# Altium integrated library Altium_Power_Supply_IC.IntLib: 96 symbols (part 1 of 2)
Pins are listed as number, name and electrical type; pins without a type are passive.

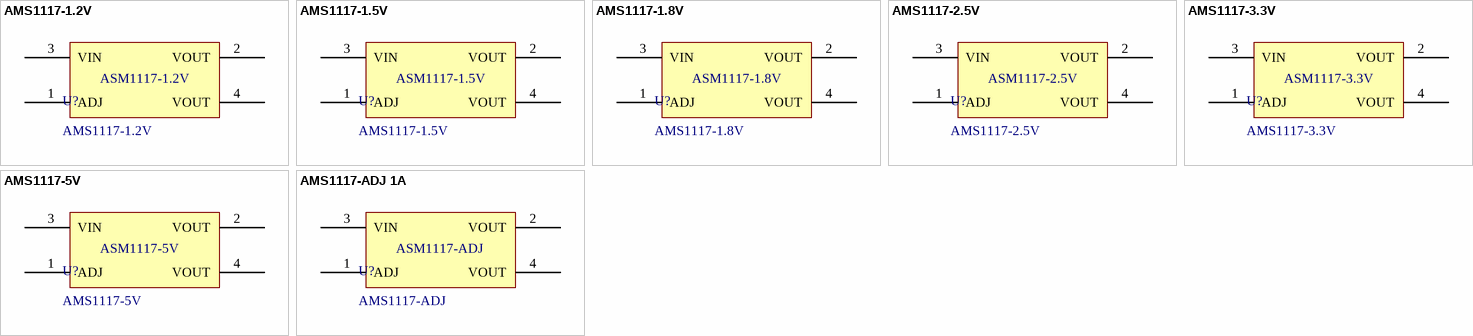
[diagram p0: symbols AMS1117-1.2V to AMS1117-ADJ 1A]

## AMS1117-1.2V
designator U?
AMS1117-1.2V, OUT 1.2V 1A.; Manufacturer: AMS; Pad Count: 4; Current Output Maximum: 1A; Voltage Input Maximum: 15V; Manufacturer Part Number: *; Part Number: *; Current Input Maximum: *; Supplier 1 Link: *; Supplier 1 Name: *; Supplier 2 Link: *; Supplier 2 Name: *; Supplier 2 Part Number: *; Supplier 3 Link: https://www.thegioiic.com/ams1117-1-2v-ic-on-ap-1-2v-1a-sot-223; Supplier 3 Name: ThegioiIC; Supplier 3 Part Number: *; Voltage Output: 1.2V; Mounting Technology: SMD; Supplier 1 Part Number: *; Datasheet: *
footprint AMS1117-1.2V SOT223 (SOT223, 4-Leads, Body 6.51x7.00mm, Pitch 2.29mm)
pins: 1 ADJ (power), 2 VOUT, 3 VIN, 4 VOUT (power)
text: ASM1117-1.2V

## AMS1117-1.5V
designator U?
AMS1117-1.5V, OUT 1.5V 1A.; Manufacturer: AMS; Pad Count: 4; Current Output Maximum: 1A; Voltage Input Maximum: 15V; Manufacturer Part Number: *; Part Number: *; Current Input Maximum: *; Supplier 1 Link: *; Supplier 1 Name: *; Supplier 2 Link: *; Supplier 2 Name: *; Supplier 2 Part Number: *; Supplier 3 Link: https://www.thegioiic.com/ams1117-1-5v-ic-on-ap-1-5v-1a-sot-223; Supplier 3 Name: ThegioiIC; Supplier 3 Part Number: *; Voltage Output: 1.5V; Mounting Technology: SMD; Supplier 1 Part Number: *; Datasheet: http://www.ams-semitech.com/attachments/File/AMS1117_20120314.pdf
footprint AMS1117-1.5V SOT223 (SOT223, 4-Leads, Body 6.51x7.00mm, Pitch 2.29mm)
pins: 1 ADJ (power), 2 VOUT, 3 VIN, 4 VOUT (power)
text: ASM1117-1.5V

## AMS1117-1.8V
designator U?
AMS1117-1.8V, OUT 1.8V 1A.; Manufacturer: AMS; Pad Count: 4; Current Output Maximum: 1A; Voltage Input Maximum: 15V; Manufacturer Part Number: *; Part Number: *; Current Input Maximum: *; Supplier 1 Link: *; Supplier 1 Name: *; Supplier 2 Link: *; Supplier 2 Name: *; Supplier 2 Part Number: *; Supplier 3 Link: https://www.thegioiic.com/ams1117-1-8v-ic-on-ap-1-8v-1a-sot-223; Supplier 3 Name: ThegioiIC; Supplier 3 Part Number: *; Voltage Output: 1.8V; Mounting Technology: SMD; Supplier 1 Part Number: *; Datasheet: *
footprint AMS1117-1.8V SOT223 (SOT223, 4-Leads, Body 6.51x7.00mm, Pitch 2.29mm)
pins: 1 ADJ (power), 2 VOUT, 3 VIN, 4 VOUT (power)
text: ASM1117-1.8V

## AMS1117-2.5V
designator U?
AMS1117-2.5V, OUT 2.5V 1A.; Manufacturer: AMS; Pad Count: 4; Current Output Maximum: 1A; Voltage Input Maximum: 15V; Manufacturer Part Number: *; Part Number: *; Current Input Maximum: *; Supplier 1 Link: *; Supplier 1 Name: *; Supplier 2 Link: *; Supplier 2 Name: *; Supplier 2 Part Number: *; Supplier 3 Link: https://www.thegioiic.com/ams1117-2-5v-ic-on-ap-2-5v-1a-sot-223; Supplier 3 Name: ThegioiIC; Supplier 3 Part Number: *; Voltage Output: 2.5V; Mounting Technology: SMD; Supplier 1 Part Number: *; Datasheet: http://www.advanced-monolithic.com/pdf/ds1117.pdf
footprint AMS1117-2.5V SOT223 (SOT223, 4-Leads, Body 6.51x7.00mm, Pitch 2.29mm)
pins: 1 ADJ (power), 2 VOUT, 3 VIN, 4 VOUT (power)
text: ASM1117-2.5V

## AMS1117-3.3V
designator U?
AMS1117-3.3V, OUT 3.3V 1A.; Manufacturer: AMS; Pad Count: 4; Current Output Maximum: 1A; Voltage Input Maximum: 15V; Manufacturer Part Number: *; Part Number: *; Current Input Maximum: *; Supplier 1 Link: *; Supplier 1 Name: *; Supplier 2 Link: *; Supplier 2 Name: *; Supplier 2 Part Number: *; Supplier 3 Link: https://www.thegioiic.com/ams1117-3-3v-ic-on-ap-3-3v-1a-sot-223; Supplier 3 Name: ThegioiIC; Supplier 3 Part Number: *; Voltage Output: 3.3V; Mounting Technology: SMD; Supplier 1 Part Number: *; Datasheet: http://www.advanced-monolithic.com/pdf/ds1117.pdf
footprint AMS1117-3.3V SOT223 (SOT223, 4-Leads, Body 6.51x7.00mm, Pitch 2.29mm)
pins: 1 ADJ (power), 2 VOUT, 3 VIN, 4 VOUT (power)
text: ASM1117-3.3V

## AMS1117-5V
designator U?
AMS1117-5V, OUT 5V 1A.; Manufacturer: AMS; Pad Count: 4; Current Output Maximum: 1A; Voltage Input Maximum: 15V; Manufacturer Part Number: *; Part Number: *; Current Input Maximum: *; Supplier 1 Link: *; Supplier 1 Name: *; Supplier 2 Link: *; Supplier 2 Name: *; Supplier 2 Part Number: *; Supplier 3 Link: https://www.thegioiic.com/ams1117-5-0v-ic-on-ap-5v-1a-sot-223; Supplier 3 Name: ThegioiIC; Supplier 3 Part Number: *; Voltage Output: 5V; Mounting Technology: SMD; Supplier 1 Part Number: *; Datasheet: *
footprint AMS1117-5V SOT223 (SOT223, 4-Leads, Body 6.51x7.00mm, Pitch 2.29mm)
pins: 1 ADJ (power), 2 VOUT, 3 VIN, 4 VOUT (power)
text: ASM1117-5V

## AMS1117-ADJ 1A
designator U?, comment AMS1117-ADJ
AMS1117-ADJ, OUT 1.2V-5V 800mA, IN 15V 1A; Manufacturer: UMW; Manufacturer Part Number: AMS1117-1.2; Pad Count: 4; Voltage Output: 1.2 - 5V; Part Number: *; Current Input Maximum: 1A; Current Output Maximum: 800mA; Supplier 1 Link: https://www.digikey.com/en/products/detail/umw/AMS1117-1-2/17635209; Supplier 1 Name: Digikey; Supplier 2 Link: *; Supplier 2 Name: *; Supplier 2 Part Number: *; Supplier 3 Link: https://www.thegioiic.com/ams1117-adj-ic-dieu-chinh-dien-ap-1a-sot-223; Supplier 3 Name: ThegioiIC; Supplier 3 Part Number: *; Voltage Input Maximum: 15V; Mounting Technology: SMD; Supplier 1 Part Number: 4518-AMS1117-1.2TR-ND; Datasheet: https://media.digikey.com/pdf/Data%20Sheets/UTD%20Semi%20PDFs/AMS1117.pdf
footprint AMS1117-ADJ SOT223 (SOT223, 4-Leads, Body 6.51x7.00mm, Pitch 2.29mm)
pins: 1 ADJ (power), 2 VOUT, 3 VIN, 4 VOUT (power)
text: ASM1117-ADJ


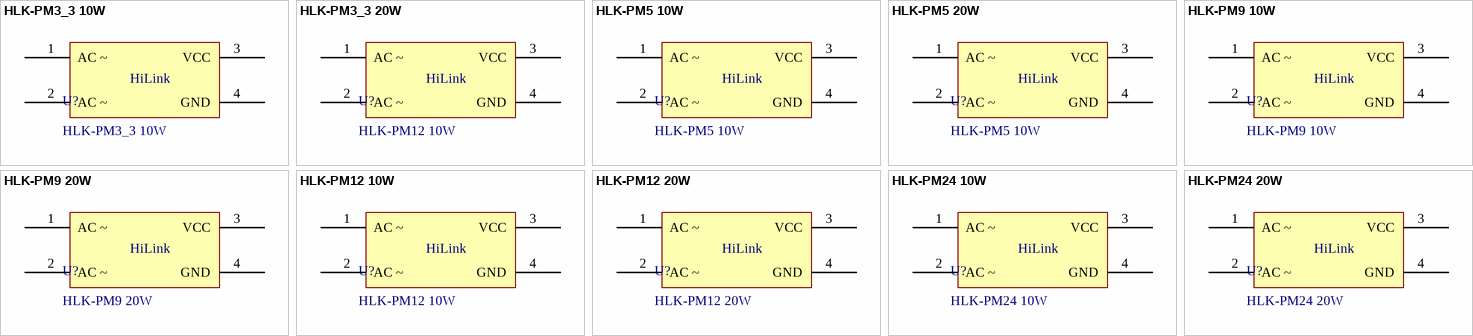
[diagram p1: symbols HLK-PM3_3 10W to HLK-PM24 20W]

## HLK-PM3_3 10W
designator U?
HLK-PM3_3 AC-DC 220-3.3V 10W; Voltage Output: 3.3VDC; Current Output: 3A; Voltage Input: 220VAC; Supply 3 Name: Thegioiic; Mounting Technology: TH; Power Output: 10W; Current Input: *; Power Input: *; Datasheet: https://www.hlktech.com/en/Product/Details/29; Supply 1 Name: *; Supply 1 SN: *; Supply 1 URL: *; Supply 2 Name: *; Supply 2 SN: *; Supply 2 URL: *; Supply 3 SN: HLK-PM3_3 10W; Supply 3 URL: *
footprint HLK-10M
pins: 1 AC ~, 2 AC ~, 3 VCC, 4 GND
text: HiLink

## HLK-PM3_3 20W
designator U?, comment HLK-PM12 10W
HLK-PM3_3 AC-DC 220-3.3V 20W; Current Output: 6.1A; Voltage Input: 220VAC; Voltage Output: 3.3VDC; Supply 3 Name: Thegioiic; Supply 3 SN: HLK-PM3_3 20W; Mounting Technology: TH; Power Output: 20W; Datasheet: https://www.hlktech.com/en/Goods-49.html
footprint HLK-20M
pins: 1 AC ~, 2 AC ~, 3 VCC, 4 GND
text: HiLink

## HLK-PM5 10W
designator U?
HLK-PM5 AC-DC 220-5V 10W; Voltage Input: 220VAC; Current Output: 2A; Supply 3 Name: Thegioiic; Voltage Output: 5VDC; Mounting Technology: TH; Power Output: 10W; Supply 3 SN: HLK-PM5 10W; Datasheet: https://www.hlktech.com/en/Product/Details/29
footprint HLK-10M
pins: 1 AC ~, 2 AC ~, 3 VCC, 4 GND
text: HiLink

## HLK-PM5 20W
designator U?, comment HLK-PM5 10W
HLK-PM5 AC-DC 220-5V 20W; Voltage Input: 220VAC; Current Output: 4A; Supply 3 Name: Thegioiic; Supply 3 SN: HLK-PM5 20W; Voltage Output: 5VDC; Mounting Technology: TH; Power Output: 20W; Datasheet: https://www.hlktech.com/en/Goods-49.html
footprint HLK-20M
pins: 1 AC ~, 2 AC ~, 3 VCC, 4 GND
text: HiLink

## HLK-PM9 10W
designator U?
HLK-PM9 AC-DC 220-9V 10W; Voltage Input: 220VAC; Current Output: 1.1A; Supply 3 Name: Thegioiic; Voltage Output: 9VDC; Mounting Technology: TH; Power Output: 10W; Supply 3 SN: HLK-PM9 10W; Datasheet: https://www.hlktech.com/en/Product/Details/29
footprint HLK-10M
pins: 1 AC ~, 2 AC ~, 3 VCC, 4 GND
text: HiLink

## HLK-PM9 20W
designator U?
HLK-PM9 AC-DC 220-9V 20W; Voltage Input: 220VAC; Current Output: 2.2A; Supply 3 Name: Thegioiic; Voltage Output: 9VDC; Mounting Technology: TH; Power Output: 20W; Supply 3 SN: HLK-PM9 20W; Datasheet: https://www.hlktech.com/en/Goods-49.html
footprint HLK-20M
pins: 1 AC ~, 2 AC ~, 3 VCC, 4 GND
text: HiLink

## HLK-PM12 10W
designator U?
HLK-PM12 AC-DC 220-12V 10W; Voltage Input: 220VAC; Current Output: 0.83A; Supply 3 Name: Thegioiic; Voltage Output: 12VDC; Mounting Technology: TH; Power Output: 10W; Supply 3 SN: HLK-PM12 10W; Datasheet: https://www.hlktech.com/en/Product/Details/29
footprint HLK-10M
pins: 1 AC ~, 2 AC ~, 3 VCC, 4 GND
text: HiLink

## HLK-PM12 20W
designator U?
HLK-PM12 AC-DC 220-12V 20W; Voltage Input: 220VAC; Current Output: 1.6A; Supply 3 Name: Thegioiic; Voltage Output: 12VDC; Mounting Technology: TH; Power Output: 20W; Supply 3 SN: HLK-PM12 20W; Datasheet: https://www.hlktech.com/en/Goods-49.html
footprint HLK-20M
pins: 1 AC ~, 2 AC ~, 3 VCC, 4 GND
text: HiLink

## HLK-PM24 10W
designator U?
HLK-PM24 AC-DC 220-24V 10W; Voltage Input: 220VAC; Current Output: 0.42A; Supply 3 Name: Thegioiic; Voltage Output: 24VDC; Mounting Technology: TH; Power Output: 10W; Supply 3 SN: HLK-PM24 10W; Datasheet: https://www.hlktech.com/en/Product/Details/29
footprint HLK-10M
pins: 1 AC ~, 2 AC ~, 3 VCC, 4 GND
text: HiLink

## HLK-PM24 20W
designator U?
HLK-PM24 AC-DC 220-24V 10W; Voltage Input: 220VAC; Current Output: 0.83A; Supply 3 Name: Thegioiic; Voltage Output: 24VDC; Mounting Technology: TH; Power Output: 20W; Supply 3 SN: HLK-PM24 20W; Datasheet: https://www.hlktech.com/en/Goods-49.html
footprint HLK-20M
pins: 1 AC ~, 2 AC ~, 3 VCC, 4 GND
text: HiLink


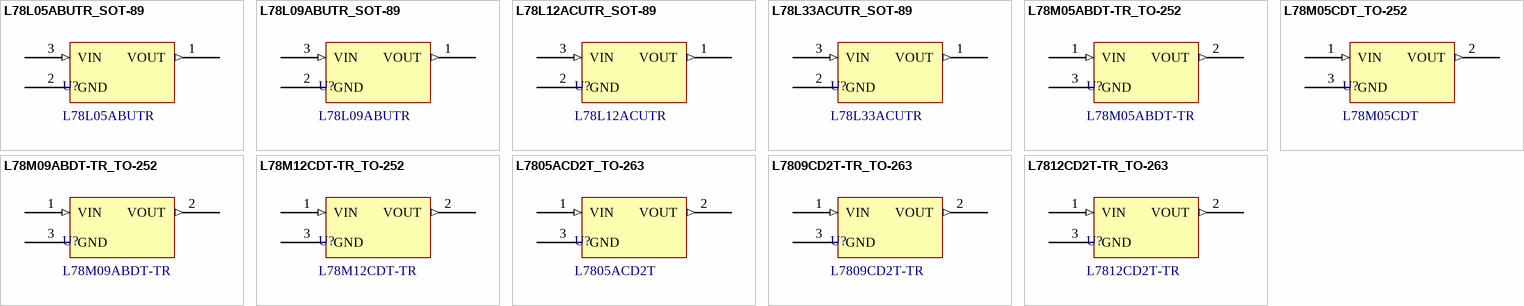
[diagram p2: symbols L78L05ABUTR_SOT-89 to L7812CD2T-TR_TO-263]

## L78L05ABUTR_SOT-89
designator U?, comment L78L05ABUTR
Out: 5V, 100mA; In: 7V to 30V; Pacakge: SOT-89; Supply 1 Name: Mouser; Supply 1 SN: 511-L78L05ABU; Supply 2 Name: DigiKey; Supply 2 SN: 497-1181-2-ND; Supply 3 Name: thegioiic; Datasheet: https://www.st.com/resource/en/datasheet/l78l.pdf; Output Current: 100mA; Package: SOT-89; Supply 1 URL: https://www.mouser.com/ProductDetail/STMicroelectronics/L78L05ABUTR?qs=1feNxqzJ94QQZYRl%252B78DYA%3D%3D; Supply 2 URL: https://www.digikey.com/en/products/detail/stmicroelectronics/L78L05ABUTR/585705; Supply 3 URL: https://www.thegioiic.com/l78l05-ic-on-ap-5v-100ma; V_IN range: 7V to 30V; V_OUT: 5V
footprint SOT-89
pins: 1 VOUT (out), 2 GND, 3 VIN (in)

## L78L09ABUTR_SOT-89
designator U?, comment L78L09ABUTR
Out: 9V, 100mA; In: 11V to 30V; Pacakge: SOT-89; Supply 1 Name: Mouser; Supply 1 SN: 511-L78L09ABU-TR; Supply 2 Name: DigiKey; Supply 2 SN: 497-7273-2-ND; Supply 3 Name: thegioiic; Datasheet: https://www.st.com/resource/en/datasheet/l78l.pdf; Output Current: 100mA; Package: SOT-89; Supply 1 URL: https://www.mouser.com/ProductDetail/STMicroelectronics/L78L09ABUTR?qs=1X5Df8S5MyhPYDpOL9OOJA%3D%3D; Supply 2 URL: https://www.digikey.com/en/products/detail/stmicroelectronics/L78L09ABUTR/1038278?s=N4IgTCBcDaIDIHYAccAMBOAggIQKoBUAlEAXQF8g; Supply 3 URL: https://www.thegioiic.com/78l09s-ic-on-ap-9v-100ma; V_IN range: 11V to 30V; V_OUT: 9V
footprint SOT-89
pins: 1 VOUT (out), 2 GND, 3 VIN (in)

## L78L12ACUTR_SOT-89
designator U?, comment L78L12ACUTR
Out: 12V, 100mA; In: 14V to 35V; Pacakge: SOT-89; Supply 1 Name: Mouser; Supply 1 SN: 511-L78L12ACU; Supply 2 Name: DigiKey; Supply 2 SN: 497-1195-2-ND; Datasheet: https://www.st.com/resource/en/datasheet/l78l.pdf; Output Current: 100mA; Package: SOT-89; Supply 1 URL: https://www.mouser.com/ProductDetail/STMicroelectronics/L78L12ACUTR?qs=lsQ%2Fasl43rq%252BGNm5TGwtyg%3D%3D; Supply 2 URL: https://www.digikey.com/en/products/detail/stmicroelectronics/L78L12ACUTR/585719?s=N4IgTCBcDaIDIHYAccCMYCCBhAqgFQCUQBdAXyA; V_IN range: 14V to 35V; V_OUT: 12V
footprint SOT-89
pins: 1 VOUT (out), 2 GND, 3 VIN (in)

## L78L33ACUTR_SOT-89
designator U?, comment L78L33ACUTR
Out: 3.3V, 100mA; In: 5.3V to 30V; Pacakge: SOT-89; Supply 1 Name: Mouser; Supply 1 SN: 511-L78L33ACU; Supply 2 Name: DigiKey; Supply 2 SN: 497-1200-2-ND; Datasheet: https://www.st.com/resource/en/datasheet/l78l.pdf; Output Current: 100mA; Package: SOT-89; Supply 1 URL: https://www.mouser.com/ProductDetail/STMicroelectronics/L78L33ACUTR?qs=hDePDv5mxMFi%252BjA%2FaAMQCg%3D%3D; Supply 2 URL: https://www.digikey.com/en/products/detail/stmicroelectronics/L78L33ACUTR/585724?s=N4IgTCBcDaIDIHYAccDMqCCBhAqgFQCUQBdAXyA; V_IN range: 5.3V to 30V; V_OUT: 3.3V
footprint SOT-89
pins: 1 VOUT (out), 2 GND, 3 VIN (in)

## L78M05ABDT-TR_TO-252
designator U?, comment L78M05ABDT-TR
Out: 5V, 500mA; In: 7V to 35V; Pacakge: TO-252; Supply 1 Name: Mouser; Supply 1 SN: 511-L78M05ABDT-TR; Supply 2 Name: DigiKey; Supply 2 SN: 497-1201-2-ND; Supply 3 Name: thegioiic; Datasheet: https://www.mouser.com/datasheet/2/389/l78m-974157.pdf; Output Current: 500mA; Package: TO-252; Supply 1 URL: https://www.mouser.com/ProductDetail/STMicroelectronics/L78M05ABDT-TR?qs=kdoK93vJZIY3pGnUXsif4w%3D%3D; Supply 2 URL: https://www.digikey.com/en/products/detail/stmicroelectronics/L78M05ABDT-TR/585725?s=N4IgTCBcDaIDIHYAcBZADAVgIICEAiAKgLQEBKIAugL5A; Supply 3 URL: https://www.thegioiic.com/l78m05abdt-tr-ic-on-ap-5v-0-5a; V_IN range: 7V to 35V; V_OUT: 5V
footprint TO-252 (D-PAK)
pins: 1 VIN (in), 2 VOUT (out), 3 GND

## L78M05CDT_TO-252
designator U?, comment L78M05CDT
Out: 5V, 500mA; In: 7V to 35V; Pacakge: TO-252; Supply 1 Name: Mouser; Supply 1 SN: 511-L78M05CDT; Supply 2 Name: DigiKey; Supply 2 SN: 497-2956-5-ND; Supply 3 Name: thegioiic; Datasheet: https://www.mouser.com/datasheet/2/389/l78m-1849664.pdf; Output Current: 500mA; Package: TO-252; Supply 1 URL: https://www.mouser.com/ProductDetail/STMicroelectronics/L78M05CDT?qs=EYQuxaDwR79rnNxSL0UEZA%3D%3D; Supply 2 URL: https://www.digikey.com/en/products/detail/stmicroelectronics/L78M05CDT/634720; Supply 3 URL: https://www.thegioiic.com/l78m05cdt-ic-on-ap-5v-500ma; V_IN range: 7V to 35V; V_OUT: 5V
footprint TO-252 (D-PAK)
pins: 1 VIN (in), 2 VOUT (out), 3 GND

## L78M09ABDT-TR_TO-252
designator U?, comment L78M09ABDT-TR
Out: 9V, 500mA; In: 11V to 35V; Pacakge: TO-252; Supply 1 Name: Mouser; Supply 1 SN: 511-L78M09ABDT-TR; Supply 2 Name: DigiKey; Supply 2 SN: 497-14163-2-ND; Supply 3 Name: thegioiic; Datasheet: https://www.mouser.com/datasheet/2/389/l78m-974157.pdf; Output Current: 500mA; Package: TO-252; Supply 1 URL: https://www.mouser.com/ProductDetail/STMicroelectronics/L78M09ABDT-TR?qs=1MLYYPJBAjHSYObOJcvCaA%3D%3D; Supply 2 URL: https://www.digikey.com/en/products/detail/stmicroelectronics/L78M09ABDT-TR/1663447?s=N4IgTCBcDaIDIHYAcBZADATgIICEAiAKgLQEBKIAugL5A; Supply 3 URL: https://www.thegioiic.com/l78m09abdt-tr-ic-on-ap-9v-0-5a; V_IN range: 11V to 35V; V_OUT: 9V
footprint TO-252 (D-PAK)
pins: 1 VIN (in), 2 VOUT (out), 3 GND

## L78M12CDT-TR_TO-252
designator U?, comment L78M12CDT-TR
Out: 12V, 500mA; In: 14V to 35V; Pacakge: TO-252; Supply 1 Name: Mouser; Supply 1 SN: 511-L78M12CDT-TR; Supply 2 Name: DigiKey; Supply 2 SN: 497-1211-2-ND; Supply 3 Name: thegioiic; Datasheet: https://www.mouser.com/datasheet/2/389/l78m-974157.pdf; Output Current: 500mA; Package: TO-252; Supply 1 URL: https://www.mouser.vn/ProductDetail/STMicroelectronics/L78M12CDT-TR?qs=qc0R%252BzdqlhoQMD%252Bqk94JGQ%3D%3D; Supply 2 URL: https://www.digikey.com/en/products/detail/stmicroelectronics/L78M12CDT-TR/585735?s=N4IgTCBcDaIDIHYAcBZAjGAwgEQCoFpcAlEAXQF8g; Supply 3 URL: https://www.thegioiic.com/l78m12cdt-tr-ic-on-ap-12v-500ma; V_IN range: 14V to 35V; V_OUT: 12V
footprint TO-252 (D-PAK)
pins: 1 VIN (in), 2 VOUT (out), 3 GND

## L7805ACD2T_TO-263
designator U?, comment L7805ACD2T
Out: 5V, 1.5A; In: 7V to 35V; Pacakge: TO-263; Supply 1 Name: Mouser; Supply 1 SN: 511-L7805ACD2T-TR; Supply 2 Name: DigiKey; Supply 2 SN: 497-7253-2-ND; Supply 3 Name: thegioiic; Datasheet: https://www.st.com/resource/en/datasheet/l78.pdf; Output Current: 1.5A; Package: TO-263; Supply 1 URL: https://www.mouser.com/ProductDetail/STMicroelectronics/L7805ACD2T-TR?qs=Ctxo64yJVFuOLXlPPZdJUQ%3D%3D; Supply 2 URL: https://www.digikey.com/en/products/detail/stmicroelectronics/L7805ACD2T-TR/1038230; Supply 3 URL: https://www.thegioiic.com/l7805acd2t-ic-on-ap-5v-1-5a; V_IN range: 7V to 35V; V_OUT: 5V
footprint TO-263 (D2PAK)
pins: 1 VIN (in), 2 VOUT (out), 3 GND

## L7809CD2T-TR_TO-263
designator U?, comment L7809CD2T-TR
Out: 9V, 1.5A; In: 11V to 35V; Pacakge: TO-263; Supply 1 Name: Mouser; Supply 1 SN: 511-L7809CD2T-TR; Supply 2 Name: DigiKey; Supply 2 SN: 497-1176-2-ND; Datasheet: https://www.st.com/resource/en/datasheet/l78.pdf; Output Current: 1.5A; Package: TO-263; Supply 1 URL: https://www.mouser.com/ProductDetail/STMicroelectronics/L7809CD2T-TR?qs=15AzPhfEMg9%2FqG49g2z5xQ%3D%3D; Supply 2 URL: https://www.digikey.com/en/products/detail/stmicroelectronics/L7809CD2T-TR/585700?s=N4IgTCBcDaIDIHYAcAGAnAYQCJgCoFpcAlEAXQF8g; V_IN range: 11V to 35V; V_OUT: 9V
footprint TO-263 (D2PAK)
pins: 1 VIN (in), 2 VOUT (out), 3 GND

## L7812CD2T-TR_TO-263
designator U?, comment L7812CD2T-TR
Out: 12V, 1.5A; In: 14V to 35V; Pacakge: TO-263; Supply 1 Name: Mouser; Supply 1 SN: 511-L7812CD2T-TR; Supply 2 Name: DigiKey; Supply 2 SN: 497-1178-2-ND; Supply 3 Name: thegioiic; Datasheet: https://www.st.com/resource/en/datasheet/l78.pdf; Output Current: 1.5A; Package: TO-263; Supply 1 URL: https://www.mouser.vn/ProductDetail/STMicroelectronics/L7812CD2T-TR?qs=St21y7kBsOZRCvbPRwGnTg%3D%3D; Supply 2 URL: https://www.digikey.com/en/products/detail/stmicroelectronics/L7812CD2T-TR/585702?s=N4IgTCBcDaIDIHYAcBGMBhAImAKgWhwCUQBdAXyA; Supply 3 URL: https://www.thegioiic.com/l7812cd2t-cn-ic-on-ap-12v-1-5a; V_IN range: 14V to 35V; V_OUT: 12V
footprint TO-263 (D2PAK)
pins: 1 VIN (in), 2 VOUT (out), 3 GND


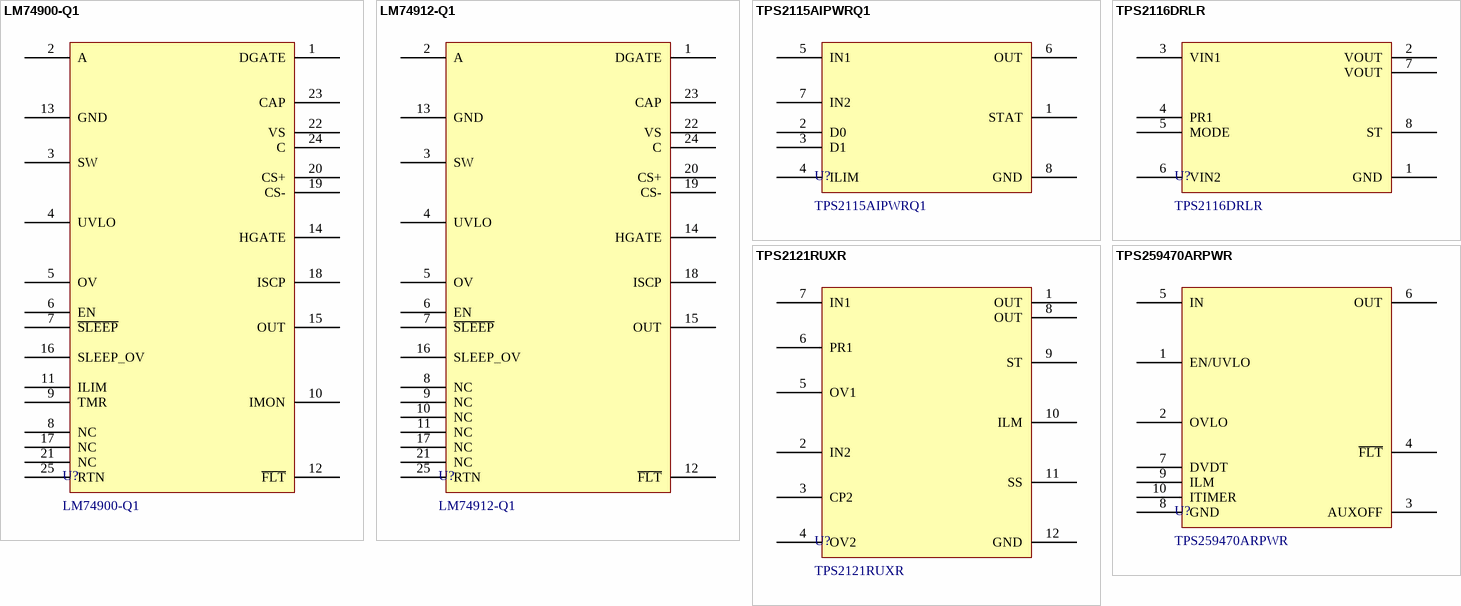
[diagram p3: symbols LM74900-Q1 to TPS259470ARPWR]

## LM74900-Q1
designator U?
Automotive ideal diode with circuit breaker, under- and overvoltage protection with fault output; Manufacturer: Texas Instruments; Input Voltage: 3-65 V; Number of channels: 1; Output Current: N.A; Supply 1 Name: Mouser; Supply 1 SN: 595-LM74900QRGERQ1; Supply 2 Name: Digikey; Supply 2 SN: 296-LM74900QRGERQ1TR-ND; Active status: Active; Device Type: Ideal diode controller; FET: External back-to-back FET; Supply 3 Name: thegioiic; ComponentLink1Description: Datasheet link; ComponentLink1URL: https://www.ti.com/lit/gpn/lm74900-q1; ComponentLink2Description: Supply 1 URL; ComponentLink2URL: https://www.mouser.vn/ProductDetail/Texas-Instruments/LM74900QRGERQ1?qs=1Kr7Jg1SGW%252BjHxEKWn%2FhLA%3D%3D; ComponentLink3Description: Supply 2 URL; ComponentLink3URL: https://www.digikey.com/en/products/detail/texas-instruments/lm74900qrgerq1/21283919; Manufacturer SN: LM74900-Q1; Mounting Style: SMD/SMT; Output Voltage: 3-65 V; Package / Case: VQFN-24; Current limit max: N.A; Ron: N.A; Supply 3 SN: N.A
footprint LM74900-Q1 (QFN, 24-Leads, Body 4.00x4.00mm, Pitch 0.50mm, Thermal Pad 2.10x2.10mm, IPC Medium Density)
pins: 1 DGATE, 2 A, 3 SW, 4 UVLO, 5 OV, 6 EN, 7 ~{SLEEP}, 8 NC, 9 TMR, 10 IMON, 11 ILIM, 12 ~{FLT}, 13 GND, 14 HGATE, 15 OUT, 16 SLEEP_OV, 17 NC, 18 ISCP, 19 CS-, 20 CS+, 21 NC, 22 VS, 23 CAP, 24 C, 25 RTN

## LM74912-Q1
designator U?
Automotive ideal diode with integrated over-voltage and short circuit protection w/ fault output; Manufacturer: Texas Instruments; Input Voltage: 3-65 V; Number of channels: 1; Output Current: N.A; Supply 1 Name: Mouser; Supply 2 Name: Digikey; Active status: Active; Device Type: Ideal diode controller; FET: External back-to-back FET; Supply 3 Name: thegioiic; ComponentLink1Description: Datasheet link; ComponentLink1URL: https://www.ti.com/lit/gpn/lm74912-q1; ComponentLink2Description: Supply 1 URL; ComponentLink2URL: N.A; ComponentLink3Description: Supply 2 URL; ComponentLink3URL: N.A; Manufacturer SN: LM74912-Q1; Mounting Style: SMD/SMT; Output Voltage: 3-65 V; Package / Case: VQFN-24; Supply 1 SN: N.A; Supply 2 SN: N.A; Current limit max: N.A; Ron: N.A; Supply 3 SN: N.A
footprint LM74912-Q1 (QFN, 24-Leads, Body 4.00x4.00mm, Pitch 0.50mm, Thermal Pad 2.10x2.10mm, IPC Medium Density)
pins: 1 DGATE, 2 A, 3 SW, 4 UVLO, 5 OV, 6 EN, 7 ~{SLEEP}, 8 NC, 9 NC, 10 NC, 11 NC, 12 ~{FLT}, 13 GND, 14 HGATE, 15 OUT, 16 SLEEP_OV, 17 NC, 18 ISCP, 19 CS-, 20 CS+, 21 NC, 22 VS, 23 CAP, 24 C, 25 RTN

## TPS2115AIPWRQ1
designator U?
2.8-V to 5.5-V, 84-mΩ, 1.25-A, automotive power mux with manual, automatic switchover; Manufacturer: Texas Instruments; Input Voltage: 2.8-5.5V; Number of channels: 1; Output Current: 1.25A; Supply 1 Name: Mouser; Supply 1 SN: 595-TPS2115AIPWRQ1; Supply 2 Name: Digikey; Supply 2 SN: 296-24155-2-ND; Active status: Active; FET: Internal; Ron: 84 mOhm; Supply 3 Name: thegioiic; Supply 3 SN: N.A; ComponentLink1Description: Datasheet link; ComponentLink1URL: https://www.ti.com/lit/gpn/TPS2115A-Q1; ComponentLink2Description: Supply 1 URL; ComponentLink2URL: https://www.mouser.vn/ProductDetail/Texas-Instruments/TPS2115AIPWRQ1?qs=IDSsxkoac0yJ8twoaysKxw%3D%3D; ComponentLink3Description: Supply 2 URL; ComponentLink3URL: https://www.digikey.com/en/products/detail/texas-instruments/tps2115aipwrq1/2000827; Manufacturer SN: TPS2115AIPWRQ1; Mounting Style: SMD/SMT; Output Voltage: 2.8-5.5V; Package / Case: TSSOP-8; Current limit max: 1.25A; Device Type: Power MUX
footprint TPS2115AIPWRQ1 (TSOP, 8-Leads, Body 3.00x4.40mm, Pitch 0.65mm, IPC Medium Density)
pins: 1 STAT, 2 D0, 3 D1, 4 ILIM, 5 IN1, 6 OUT, 7 IN2, 8 GND

## TPS2116DRLR
designator U?
1.6-V to 5.5-V, 40-mOhm, 2.5-A, low-IQ, priority power multiplexer; Manufacturer: Texas Instruments; Input Voltage: 1.6-5.5V; Number of channels: 1; Output Current: 2.5A; Supply 1 Name: Mouser; Supply 1 SN: 595-TPS2116DRLR; Supply 2 Name: Digikey; Supply 2 SN: 296-TPS2116DRLRTR-ND; Active status: Active; Device Type: Power MUX; FET: Internal; Ron: 40 mOhm; Supply 3 Name: thegioiic; Supply 3 SN: N.A; ComponentLink1Description: Datasheet link; ComponentLink1URL: https://www.ti.com/lit/gpn/TPS2116; ComponentLink2Description: Supply 1 URL; ComponentLink2URL: https://www.mouser.vn/ProductDetail/Texas-Instruments/TPS2116DRLR?qs=aP1CjGhiNiGo3XAyXcVPaQ%3D%3D; ComponentLink3Description: Supply 2 URL; ComponentLink3URL: https://www.digikey.com/en/products/detail/texas-instruments/tps2116drlr/15205127; Manufacturer SN: TPS2116DRLR; Mounting Style: SMD/SMT; Output Voltage: 1.6-5.5V; Package / Case: SOT-5X3-8; Current limit max: 2.5A
footprint TPS2116DRLR (SON, 8-Leads, Body 2.10x1.60mm, Pitch 0.50mm, IPC Medium Density)
pins: 1 GND, 2 VOUT, 3 VIN1, 4 PR1, 5 MODE, 6 VIN2, 7 VOUT, 8 ST

## TPS2121RUXR
designator U?
2.7-V to 22-V, 56-mΩ, 4.5-A, power mux with seamless switchover; Manufacturer: Texas Instruments; Input Voltage: 2.7-22V; Number of channels: 1; Output Current: 4.5A; Supply 1 Name: Mouser; Supply 1 SN: 595-TPS2121RUXR; Supply 2 Name: Digikey; Supply 2 SN: 296-53410-2-ND; Active status: Active; FET: Internal; Ron: 56 mOhm; Supply 3 Name: thegioiic; Supply 3 SN: N.A; ComponentLink1Description: Datasheet link; ComponentLink1URL: https://www.ti.com/lit/gpn/tps2121; ComponentLink2Description: Supply 1 URL; ComponentLink2URL: https://www.mouser.vn/ProductDetail/Texas-Instruments/TPS2121RUXR?qs=qSfuJ%252Bfl%2Fd7dCYiVnUfngQ%3D%3D; ComponentLink3Description: Supply 2 URL; ComponentLink3URL: https://www.digikey.com/en/products/detail/texas-instruments/tps2121ruxr/9859001; Manufacturer SN: TPS2121RUXR; Mounting Style: SMD/SMT; Output Voltage: 2.7-22V; Package / Case: VQFN-12; Current limit max: 4.5A; Device Type: Power MUX
footprint TPS2121RUXR (QFN, 12-Leads, Body 2.00x2.50mm, Pitch 0.50mm/0.70mm, IPC Medium Density)
pins: 1 OUT, 2 IN2, 3 CP2, 4 OV2, 5 OV1, 6 PR1, 7 IN1, 8 OUT, 9 ST, 10 ILM, 11 SS, 12 GND

## TPS259470ARPWR
designator U?
2.7-V to 23-V, 28-mΩ, 5.5-A eFuse with integrated reverse polarity protection; Manufacturer: Texas Instruments; Input Voltage: 2.7-23V; Number of channels: 1; Output Current: 6A; Supply 1 Name: Mouser; Supply 1 SN: 595-TPS259470ARPWR; Supply 2 Name: Digikey; Supply 2 SN: 296-TPS259470ARPWRTR-ND; Active status: Active; Device Type: eFuses and hot swap controllers; FET: Internal; Ron: 28 mOhm; Supply 3 Name: thegioiic; Supply 3 SN: N.A; ComponentLink1Description: Datasheet link; ComponentLink1URL: https://www.ti.com/general/docs/suppproductinfo.tsp?distId=26&gotoUrl=https://www.ti.com/lit/gpn/tps25947; ComponentLink2Description: Supply 1 URL; ComponentLink2URL: https://www.mouser.vn/ProductDetail/Texas-Instruments/TPS259470ARPWR?qs=iLbezkQI%252BshPGMSX3AmK8g%3D%3D; ComponentLink3Description: Supply 2 URL; ComponentLink3URL: https://www.digikey.com/en/products/detail/texas-instruments/tps259470arpwr/14123984; Manufacturer SN: TPS259470ARPWR; Mounting Style: SMD/SMT; Output Voltage: 2.7-23V; Package / Case: VQFN-10; Current limit max: 6A
footprint TPS259470ARPWR (QFN, 16-Leads, Body 2.00x2.00mm, Pitch 0.50mm, IPC Medium Density)
pins: 1 EN/UVLO, 2 OVLO, 3 AUXOFF, 4 ~{FLT}, 5 IN, 6 OUT, 7 DVDT, 8 GND, 9 ILM, 10 ITIMER


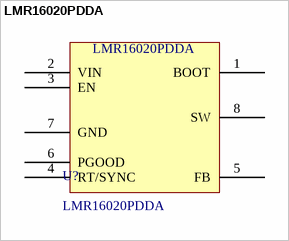
[diagram p4: symbol LMR16020PDDA]

## LMR16020PDDA
designator U?
Switching Voltage Regulators SIMPLE SWITCHER 60V, 2A Step-Down Converter with 40uA Iq 8-SO PowerPAD -40 to 125.; Manufacturer: Texas Instruments; Voltage Input: 4.3V - 60V; Voltage Output: ADJ; Supply 1 Name: Mouser; Supply 1 SN: 595-LMR16020PDDA; Supply 2 Name: DigiKey; Supply 2 SN: 296-44512-5-ND; Manufacturer Part Number: LMR16020PDDA; Mounting Technology: SMD; Current Input: *; Current Output: 2A; Datasheet: https://www.ti.com/general/docs/suppproductinfo.tsp?distId=26&gotoUrl=https://www.ti.com/lit/gpn/lmr16020; Supply 1 URL: https://www.mouser.com/ProductDetail/Texas-Instruments/LMR16020PDDA?qs=n%252BTO0c4TDSZBajvStWOY0A%3D%3D; Supply 2 URL: https://www.ti.com/lit/ds/symlink/lmr16020.pdf?HQS=dis-mous-null-mousermode-dsf-pf-null-wwe&ts=1689913563511&ref_url=https%253A%252F%252Fwww.mouser.com%252F; Supply 3 Name: *; Supply 3 SN: *; Supply 3 URL: *
footprint LMR16020PDDA (SOIC, 8-Leads, Body 4.90x3.90mm, Pitch 1.27mm)
pins: 1 BOOT (power), 2 VIN (power), 3 EN (power), 4 RT/SYNC (power), 5 FB (power), 6 PGOOD (power), 7 GND (power), 8 SW (power)


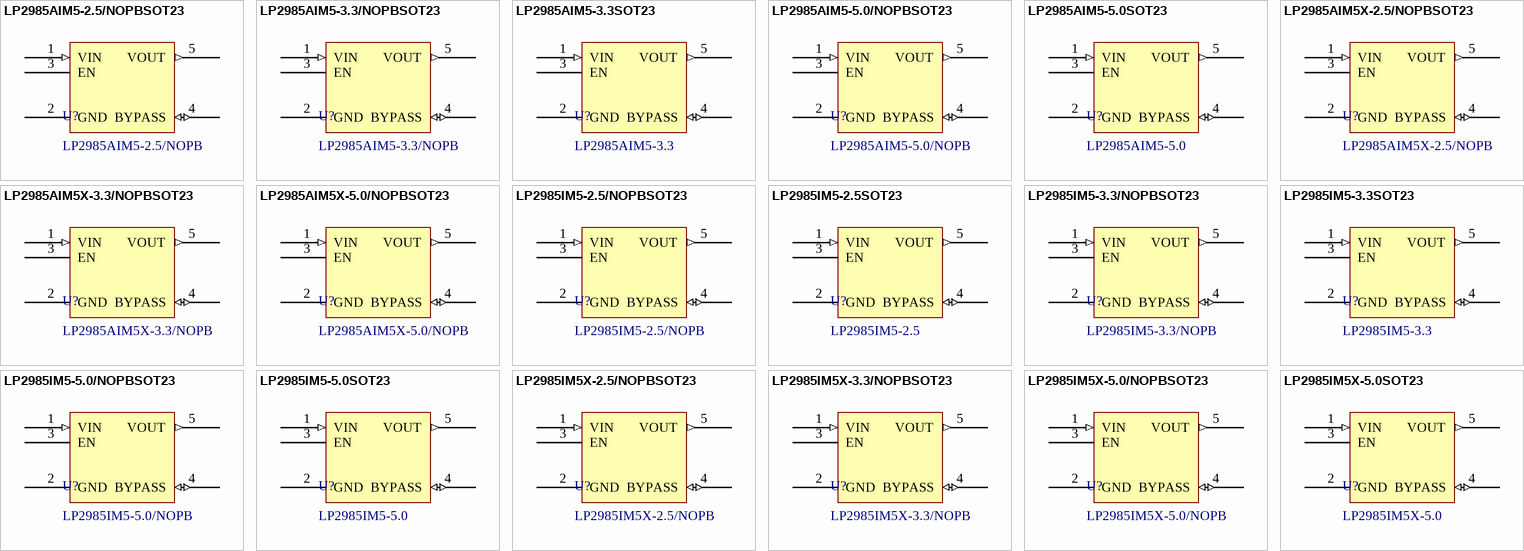
[diagram p5: symbols LP2985AIM5-2.5/NOPBSOT23 to LP2985IM5X-5.0SOT23]

## LP2985AIM5-2.5/NOPBSOT23
designator U?, comment LP2985AIM5-2.5/NOPB
Out: 2.5V, 150 mA max; In: 2.5 V to 16 V; Pacakge: SOT-23-5; Output current: Up to 150 mA; Supply 1 Name: Mouser; Supply 1 SN: 926-LP2985AIM525NOPB; Supply 2 Name: DigiKey; Supply 2 SN: LP2985AIM5-2.5/NOPBTR-ND; Datasheet: https://www.ti.com/lit/ds/symlink/lp2985.pdf?ts=1690340207505&ref_url=https%253A%252F%252Fwww.ti.com%252Fproduct%252FLP2985%253FkeyMatch%253DLM2985; Mounting Style: SMT; Package: SOT-23-5; Supply 1 URL: https://www.mouser.vn/ProductDetail/Texas-Instruments/LP2985AIM5-2.5-NOPB?qs=7lkVKPoqpbYqZbTWBUr%2FQA%3D%3D; Supply 2 URL: https://www.digikey.com/en/products/detail/texas-instruments/LP2985AIM5-2-5-NOPB/364583; V_IN range: 2.5 V to 16 V; V_OUT: 2.5V
footprint SOT23-5 (SOT143-4 as used in SP0503BAHTG)
pins: 1 VIN (in) "Input supply pin. Use a capacitor with a value of 1 µF or larger from this pin to ground.", 2 GND, 3 EN "Enable pin for the LDO. Driving the ON/OFF pin high enables the device. Driving this pin low", 4 BYPASS (io) "BYPASS pin to achieve low noise performance. Connecting an external capacitor between", 5 VOUT (out) "Output of the regulator. Use a capacitor with a value of 2.2 µF or larger from this pin to"

## LP2985AIM5-3.3/NOPBSOT23
designator U?, comment LP2985AIM5-3.3/NOPB
Out: 3.3V, 150 mA max; In: 2.5 V to 16 V; Pacakge: SOT-23-5; Output current: Up to 150 mA; Supply 1 Name: Mouser; Supply 1 SN: 926-2985AIM53.3/NOPB; Supply 2 Name: DigiKey; Supply 2 SN: LP2985AIM5-3.3/NOPBTR-ND; Supply 3 Name: thegioiic; Datasheet: https://www.ti.com/lit/ds/symlink/lp2985.pdf?ts=1690340207505&ref_url=https%253A%252F%252Fwww.ti.com%252Fproduct%252FLP2985%253FkeyMatch%253DLM2985; Mounting Style: SMT; Package: SOT-23-5; Supply 1 URL: https://www.mouser.vn/ProductDetail/Texas-Instruments/LP2985AIM5-3.3-NOPB?qs=7lkVKPoqpba5AgutHXBYsA%3D%3D; Supply 2 URL: https://www.digikey.com/en/products/detail/texas-instruments/LP2985AIM5-3-3-NOPB/364589?s=N4IgTCBcDaIDIAUwE4AcBWAggSQLLoFoBmAOiIHoA5AeQQCEQBdAXyA; Supply 3 URL: https://www.thegioiic.com/lp2985-33dbvr-ic-on-ap-3-3v-150ma; V_IN range: 2.5 V to 16 V; V_OUT: 3.3V
footprint SOT23-5 (SOT143-4 as used in SP0503BAHTG)
pins: 1 VIN (in) "Input supply pin. Use a capacitor with a value of 1 µF or larger from this pin to ground.", 2 GND, 3 EN "Enable pin for the LDO. Driving the ON/OFF pin high enables the device. Driving this pin low", 4 BYPASS (io) "BYPASS pin to achieve low noise performance. Connecting an external capacitor between", 5 VOUT (out) "Output of the regulator. Use a capacitor with a value of 2.2 µF or larger from this pin to"

## LP2985AIM5-3.3SOT23
designator U?, comment LP2985AIM5-3.3
Out: 3.3V, 150 mA max; In: 2.5 V to 16 V; Pacakge: SOT-23-5; Output current: Up to 150 mA; Supply 1 Name: Mouser; Supply 1 SN: 926-LP2985AIM5-33; Supply 2 Name: DigiKey; Supply 2 SN: 296-35910-2-ND; Supply 3 Name: thegioiic; V_IN range: 2.5 V to 16 V; Datasheet: https://www.ti.com/lit/ds/symlink/lp2985.pdf?ts=1690340207505&ref_url=https%253A%252F%252Fwww.ti.com%252Fproduct%252FLP2985%253FkeyMatch%253DLM2985; Mounting Style: SMT; Package: SOT-23-5; Supply 1 URL: https://www.mouser.vn/ProductDetail/Texas-Instruments/LP2985AIM5-3.3?qs=7lkVKPoqpbarLAafn%252BUbQg%3D%3D; Supply 2 URL: https://www.digikey.com/en/products/detail/texas-instruments/LP2985AIM5-3-3/3698168; Supply 3 URL: https://www.thegioiic.com/lp2985-33dbvr-ic-on-ap-3-3v-150ma; V_OUT: 3.3V
footprint SOT23-5 (SOT143-4 as used in SP0503BAHTG)
pins: 1 VIN (in) "Input supply pin. Use a capacitor with a value of 1 µF or larger from this pin to ground.", 2 GND, 3 EN "Enable pin for the LDO. Driving the ON/OFF pin high enables the device. Driving this pin low", 4 BYPASS (io) "BYPASS pin to achieve low noise performance. Connecting an external capacitor between", 5 VOUT (out) "Output of the regulator. Use a capacitor with a value of 2.2 µF or larger from this pin to"

## LP2985AIM5-5.0/NOPBSOT23
designator U?, comment LP2985AIM5-5.0/NOPB
Out: 5V, 150 mA max; In: 2.5 V to 16 V; Pacakge: SOT-23-5; Output current: Up to 150 mA; Supply 1 Name: Mouser; Supply 1 SN: 926-LP2985AIM550NOPB; Supply 2 Name: DigiKey; Supply 2 SN: LP2985AIM5-5.0/NOPBTR-ND; Datasheet: https://www.ti.com/lit/ds/symlink/lp2985.pdf?ts=1690340207505&ref_url=https%253A%252F%252Fwww.ti.com%252Fproduct%252FLP2985%253FkeyMatch%253DLM2985; Mounting Style: SMT; Package: SOT-23-5; Supply 1 URL: https://www.mouser.vn/ProductDetail/Texas-Instruments/LP2985AIM5-5.0-NOPB?qs=7lkVKPoqpbYsAhhQ4Pn4Tg%3D%3D; Supply 2 URL: https://www.digikey.com/en/products/detail/texas-instruments/LP2985AIM5-5-0-NOPB/364591?s=N4IgTCBcDaIDIAUwE4AcBWAggSQLLoFp0A6ABgHoA5AeQQCEQBdAXyA; V_IN range: 2.5 V to 16 V; V_OUT: 5V
footprint SOT23-5 (SOT143-4 as used in SP0503BAHTG)
pins: 1 VIN (in) "Input supply pin. Use a capacitor with a value of 1 µF or larger from this pin to ground.", 2 GND, 3 EN "Enable pin for the LDO. Driving the ON/OFF pin high enables the device. Driving this pin low", 4 BYPASS (io) "BYPASS pin to achieve low noise performance. Connecting an external capacitor between", 5 VOUT (out) "Output of the regulator. Use a capacitor with a value of 2.2 µF or larger from this pin to"

## LP2985AIM5-5.0SOT23
designator U?, comment LP2985AIM5-5.0
Out: 5V, 150 mA max; In: 2.5 V to 16 V; Pacakge: SOT-23-5; Output current: Up to 150 mA; Supply 1 Name: Mouser; Supply 1 SN: 926-LP2985AIM5-50; Supply 2 Name: DigiKey; Supply 2 SN: LP2985AIM5-5.0TR-ND; Datasheet: https://www.ti.com/lit/ds/symlink/lp2985.pdf?ts=1690340207505&ref_url=https%253A%252F%252Fwww.ti.com%252Fproduct%252FLP2985%253FkeyMatch%253DLM2985; Mounting Style: SMT; Package: SOT-23-5; Supply 1 URL: https://www.mouser.vn/ProductDetail/Texas-Instruments/LP2985AIM5-5.0?qs=7lkVKPoqpba3%2FL%2F%2FI3%252BCew%3D%3D; Supply 2 URL: https://www.digikey.com/en/products/detail/texas-instruments/LP2985AIM5-5-0/3701435; V_IN range: 2.5 V to 16 V; V_OUT: 5V
footprint SOT23-5 (SOT143-4 as used in SP0503BAHTG)
pins: 1 VIN (in) "Input supply pin. Use a capacitor with a value of 1 µF or larger from this pin to ground.", 2 GND, 3 EN "Enable pin for the LDO. Driving the ON/OFF pin high enables the device. Driving this pin low", 4 BYPASS (io) "BYPASS pin to achieve low noise performance. Connecting an external capacitor between", 5 VOUT (out) "Output of the regulator. Use a capacitor with a value of 2.2 µF or larger from this pin to"

## LP2985AIM5X-2.5/NOPBSOT23
designator U?, comment LP2985AIM5X-2.5/NOPB
Out: 2.5V, 150 mA max; In: 2.5 V to 16 V; Pacakge: SOT-23-5; Output current: Up to 150 mA; Supply 1 Name: Mouser; Supply 1 SN: 926-LP2985AIM5X25NPB; Supply 2 Name: DigiKey; Supply 2 SN: 296-LP2985AIM5X-2.5/NOPBTR-ND; Datasheet: https://www.ti.com/lit/ds/symlink/lp2985.pdf?ts=1690340207505&ref_url=https%253A%252F%252Fwww.ti.com%252Fproduct%252FLP2985%253FkeyMatch%253DLM2985; Mounting Style: SMT; Package: SOT-23-5; Supply 1 URL: https://www.mouser.vn/ProductDetail/Texas-Instruments/LP2985AIM5X-2.5-NOPB?qs=7lkVKPoqpbYgRY%252BBsOv68w%3D%3D; Supply 2 URL: https://www.digikey.com/en/products/detail/texas-instruments/LP2985AIM5X-2-5-NOPB/367665; V_IN range: 2.5 V to 16 V; V_OUT: 2.5V
footprint SOT23-5 (SOT143-4 as used in SP0503BAHTG)
pins: 1 VIN (in) "Input supply pin. Use a capacitor with a value of 1 µF or larger from this pin to ground.", 2 GND, 3 EN "Enable pin for the LDO. Driving the ON/OFF pin high enables the device. Driving this pin low", 4 BYPASS (io) "BYPASS pin to achieve low noise performance. Connecting an external capacitor between", 5 VOUT (out) "Output of the regulator. Use a capacitor with a value of 2.2 µF or larger from this pin to"

## LP2985AIM5X-3.3/NOPBSOT23
designator U?, comment LP2985AIM5X-3.3/NOPB
Out: 3.3V, 150 mA max; In: 2.5 V to 16 V; Pacakge: SOT-23-5; Output current: Up to 150 mA; Supply 1 Name: Mouser; Supply 1 SN: 926-LP2985AIM5X33NPB; Supply 2 Name: DigiKey; Supply 2 SN: LP2985AIM5X-3.3/NOPBTR-ND; Supply 3 Name: thegioiic; Datasheet: https://www.ti.com/lit/ds/symlink/lp2985.pdf?ts=1690340207505&ref_url=https%253A%252F%252Fwww.ti.com%252Fproduct%252FLP2985%253FkeyMatch%253DLM2985; Mounting Style: SMT; Package: SOT-23-5; Supply 1 URL: https://www.mouser.vn/ProductDetail/Texas-Instruments/LP2985AIM5X-3.3-NOPB?qs=7lkVKPoqpbbp4pIqwI%2FBiQ%3D%3D; Supply 2 URL: https://www.digikey.com/en/products/detail/texas-instruments/LP2985AIM5X-3-3-NOPB/367668; Supply 3 URL: https://www.thegioiic.com/lp2985-33dbvr-ic-on-ap-3-3v-150ma; V_IN range: 2.5 V to 16 V; V_OUT: 3.3V
footprint SOT23-5 (SOT143-4 as used in SP0503BAHTG)
pins: 1 VIN (in) "Input supply pin. Use a capacitor with a value of 1 µF or larger from this pin to ground.", 2 GND, 3 EN "Enable pin for the LDO. Driving the ON/OFF pin high enables the device. Driving this pin low", 4 BYPASS (io) "BYPASS pin to achieve low noise performance. Connecting an external capacitor between", 5 VOUT (out) "Output of the regulator. Use a capacitor with a value of 2.2 µF or larger from this pin to"

## LP2985AIM5X-5.0/NOPBSOT23
designator U?, comment LP2985AIM5X-5.0/NOPB
Out: 5V, 150 mA max; In: 2.5 V to 16 V; Pacakge: SOT-23-5; Output current: Up to 150 mA; Supply 1 Name: Mouser; Supply 1 SN: 926-LP2985AIM5X50NPB; Supply 2 Name: DigiKey; Supply 2 SN: LP2985AIM5X-5.0/NOPBTR-ND; Datasheet: https://www.ti.com/lit/ds/symlink/lp2985.pdf?ts=1690340207505&ref_url=https%253A%252F%252Fwww.ti.com%252Fproduct%252FLP2985%253FkeyMatch%253DLM2985; Mounting Style: SMT; Package: SOT-23-5; Supply 1 URL: https://www.mouser.vn/ProductDetail/Texas-Instruments/LP2985AIM5X-5.0-NOPB?qs=7lkVKPoqpbZIPiotm0OF3A%3D%3D; Supply 2 URL: https://www.digikey.com/en/products/detail/texas-instruments/LP2985AIM5X-5-0-NOPB/367669; V_IN range: 2.5 V to 16 V; V_OUT: 5V
footprint SOT23-5 (SOT143-4 as used in SP0503BAHTG)
pins: 1 VIN (in) "Input supply pin. Use a capacitor with a value of 1 µF or larger from this pin to ground.", 2 GND, 3 EN "Enable pin for the LDO. Driving the ON/OFF pin high enables the device. Driving this pin low", 4 BYPASS (io) "BYPASS pin to achieve low noise performance. Connecting an external capacitor between", 5 VOUT (out) "Output of the regulator. Use a capacitor with a value of 2.2 µF or larger from this pin to"

## LP2985IM5-2.5/NOPBSOT23
designator U?, comment LP2985IM5-2.5/NOPB
Out: 2.5V, 150 mA max; In: 2.5 V to 16 V; Pacakge: SOT-23-5; Output current: Up to 150 mA; Supply 1 Name: Mouser; Supply 1 SN: 926-2985IM5-2.5/NOPB; Supply 2 Name: DigiKey; Supply 2 SN: LP2985IM5-2.5/NOPBTR-ND; Datasheet: https://www.ti.com/lit/ds/symlink/lp2985.pdf?ts=1690340207505&ref_url=https%253A%252F%252Fwww.ti.com%252Fproduct%252FLP2985%253FkeyMatch%253DLM2985; Mounting Style: SMT; Package: SOT-23-5; Supply 1 URL: https://www.mouser.vn/ProductDetail/Texas-Instruments/LP2985IM5-2.5-NOPB?qs=7lkVKPoqpbaMRafyDveXFA%3D%3D; Supply 2 URL: https://www.digikey.com/en/products/detail/texas-instruments/LP2985IM5-2-5-NOPB/364601; V_IN range: 2.5 V to 16 V; V_OUT: 2.5V
footprint SOT23-5 (SOT143-4 as used in SP0503BAHTG)
pins: 1 VIN (in) "Input supply pin. Use a capacitor with a value of 1 µF or larger from this pin to ground.", 2 GND, 3 EN "Enable pin for the LDO. Driving the ON/OFF pin high enables the device. Driving this pin low", 4 BYPASS (io) "BYPASS pin to achieve low noise performance. Connecting an external capacitor between", 5 VOUT (out) "Output of the regulator. Use a capacitor with a value of 2.2 µF or larger from this pin to"

## LP2985IM5-2.5SOT23
designator U?, comment LP2985IM5-2.5
Out: 2.5V, 150 mA max; In: 2.5 V to 16 V; Pacakge: SOT-23-5; Output current: Up to 150 mA; Supply 1 Name: Mouser; Supply 1 SN: 926-LP2985IM5-25; Supply 2 Name: DigiKey; Supply 2 SN: 296-36265-2-ND; Datasheet: https://www.ti.com/lit/ds/symlink/lp2985.pdf?ts=1690340207505&ref_url=https%253A%252F%252Fwww.ti.com%252Fproduct%252FLP2985%253FkeyMatch%253DLM2985; Mounting Style: SMT; Package: SOT-23-5; Supply 1 URL: https://www.mouser.vn/ProductDetail/Texas-Instruments/LP2985IM5-2.5?qs=7lkVKPoqpbbb%2FE%2FIZr0hmA%3D%3D; Supply 2 URL: https://www.digikey.com/en/products/detail/texas-instruments/LP2985IM5-2-5/2352713; V_IN range: 2.5 V to 16 V; V_OUT: 2.5V
footprint SOT23-5 (SOT143-4 as used in SP0503BAHTG)
pins: 1 VIN (in) "Input supply pin. Use a capacitor with a value of 1 µF or larger from this pin to ground.", 2 GND, 3 EN "Enable pin for the LDO. Driving the ON/OFF pin high enables the device. Driving this pin low", 4 BYPASS (io) "BYPASS pin to achieve low noise performance. Connecting an external capacitor between", 5 VOUT (out) "Output of the regulator. Use a capacitor with a value of 2.2 µF or larger from this pin to"

## LP2985IM5-3.3/NOPBSOT23
designator U?, comment LP2985IM5-3.3/NOPB
Out: 3.3V, 150 mA max; In: 2.5 V to 16 V; Pacakge: SOT-23-5; Output current: Up to 150 mA; Supply 1 Name: Mouser; Supply 1 SN: 926-2985IM5-3.3/NOPB; Supply 2 Name: DigiKey; Supply 2 SN: LP2985IM5-3.3/NOPBTR-ND; Supply 3 Name: thegioiic; Datasheet: https://www.ti.com/lit/ds/symlink/lp2985.pdf?ts=1690340207505&ref_url=https%253A%252F%252Fwww.ti.com%252Fproduct%252FLP2985%253FkeyMatch%253DLM2985; Mounting Style: SMT; Package: SOT-23-5; Supply 1 URL: https://www.mouser.vn/ProductDetail/Texas-Instruments/LP2985IM5-3.3-NOPB?qs=7lkVKPoqpbYPPbypQ1RJZg%3D%3D; Supply 2 URL: https://www.digikey.com/en/products/detail/texas-instruments/LP2985IM5-3-3-NOPB/334961?s=N4IgTCBcDaIDIAUwE4AcBWAkgWXQWgGYA6AgegDkB5BAIRAF0BfIA; Supply 3 URL: https://www.thegioiic.com/lp2985-33dbvr-ic-on-ap-3-3v-150ma; V_IN range: 2.5 V to 16 V; V_OUT: 3.3V
footprint SOT23-5 (SOT143-4 as used in SP0503BAHTG)
pins: 1 VIN (in) "Input supply pin. Use a capacitor with a value of 1 µF or larger from this pin to ground.", 2 GND, 3 EN "Enable pin for the LDO. Driving the ON/OFF pin high enables the device. Driving this pin low", 4 BYPASS (io) "BYPASS pin to achieve low noise performance. Connecting an external capacitor between", 5 VOUT (out) "Output of the regulator. Use a capacitor with a value of 2.2 µF or larger from this pin to"

## LP2985IM5-3.3SOT23
designator U?, comment LP2985IM5-3.3
Out: 3.3V, 150 mA max; In: 2.5 V to 16 V; Pacakge: SOT-23-5; Output current: Up to 150 mA; Supply 1 Name: Mouser; Supply 1 SN: 926-LP2985IM5-33; Supply 2 Name: DigiKey; Supply 2 SN: LP2985IM5-3.3TR-ND; Supply 3 Name: thegioiic; Datasheet: https://www.ti.com/lit/ds/symlink/lp2985.pdf?ts=1690340207505&ref_url=https%253A%252F%252Fwww.ti.com%252Fproduct%252FLP2985%253FkeyMatch%253DLM2985; Mounting Style: SMT; Package: SOT-23-5; Supply 1 URL: https://www.mouser.vn/ProductDetail/Texas-Instruments/LP2985IM5-3.3?qs=7lkVKPoqpbYyrbwrqf2JcA%3D%3D; Supply 2 URL: https://www.digikey.com/en/products/detail/texas-instruments/LP2985IM5-3-3/3701436; Supply 3 URL: https://www.thegioiic.com/lp2985-33dbvr-ic-on-ap-3-3v-150ma; V_IN range: 2.5 V to 16 V; V_OUT: 3.3V
footprint SOT23-5 (SOT143-4 as used in SP0503BAHTG)
pins: 1 VIN (in) "Input supply pin. Use a capacitor with a value of 1 µF or larger from this pin to ground.", 2 GND, 3 EN "Enable pin for the LDO. Driving the ON/OFF pin high enables the device. Driving this pin low", 4 BYPASS (io) "BYPASS pin to achieve low noise performance. Connecting an external capacitor between", 5 VOUT (out) "Output of the regulator. Use a capacitor with a value of 2.2 µF or larger from this pin to"

## LP2985IM5-5.0/NOPBSOT23
designator U?, comment LP2985IM5-5.0/NOPB
Out: 5V, 150 mA max; In: 2.5 V to 16 V; Pacakge: SOT-23-5; Output current: Up to 150 mA; Supply 1 Name: Mouser; Supply 1 SN: 926-LP2985IM55.0NOPB; Supply 2 Name: DigiKey; Supply 2 SN: LP2985IM5-5.0/NOPBTR-ND; Datasheet: https://www.ti.com/lit/ds/symlink/lp2985.pdf?ts=1690340207505&ref_url=https%253A%252F%252Fwww.ti.com%252Fproduct%252FLP2985%253FkeyMatch%253DLM2985; Mounting Style: SMT; Package: SOT-23-5; Supply 1 URL: https://www.mouser.vn/ProductDetail/Texas-Instruments/LP2985IM5-5.0-NOPB?qs=7lkVKPoqpbY2QdMGYKhTqw%3D%3D; Supply 2 URL: https://www.digikey.com/en/products/detail/texas-instruments/LP2985IM5-5-0-NOPB/334960?s=N4IgTCBcDaIDIAUwE4AcBWAkgWXQWnQDoAGAegDkB5BAIRAF0BfIA; V_IN range: 2.5 V to 16 V; V_OUT: 5V
footprint SOT23-5 (SOT143-4 as used in SP0503BAHTG)
pins: 1 VIN (in) "Input supply pin. Use a capacitor with a value of 1 µF or larger from this pin to ground.", 2 GND, 3 EN "Enable pin for the LDO. Driving the ON/OFF pin high enables the device. Driving this pin low", 4 BYPASS (io) "BYPASS pin to achieve low noise performance. Connecting an external capacitor between", 5 VOUT (out) "Output of the regulator. Use a capacitor with a value of 2.2 µF or larger from this pin to"

## LP2985IM5-5.0SOT23
designator U?, comment LP2985IM5-5.0
Out: 5V, 150 mA max; In: 2.5 V to 16 V; Pacakge: SOT-23-5; Output current: Up to 150 mA; Supply 1 Name: Mouser; Supply 1 SN: 926-LP2985IM5-50; Supply 2 Name: DigiKey; Supply 2 SN: LP2985IM5-5.0TR-ND; Datasheet: https://www.ti.com/lit/ds/symlink/lp2985.pdf?ts=1690340207505&ref_url=https%253A%252F%252Fwww.ti.com%252Fproduct%252FLP2985%253FkeyMatch%253DLM2985; Mounting Style: SMT; Package: SOT-23-5; Supply 1 URL: https://www.mouser.vn/ProductDetail/Texas-Instruments/LP2985IM5-5.0?qs=7lkVKPoqpbb8j6wBLu7kIA%3D%3D; Supply 2 URL: https://www.digikey.com/en/products/detail/texas-instruments/LP2985IM5-5-0/3701437; V_IN range: 2.5 V to 16 V; V_OUT: 5V
footprint SOT23-5 (SOT143-4 as used in SP0503BAHTG)
pins: 1 VIN (in) "Input supply pin. Use a capacitor with a value of 1 µF or larger from this pin to ground.", 2 GND, 3 EN "Enable pin for the LDO. Driving the ON/OFF pin high enables the device. Driving this pin low", 4 BYPASS (io) "BYPASS pin to achieve low noise performance. Connecting an external capacitor between", 5 VOUT (out) "Output of the regulator. Use a capacitor with a value of 2.2 µF or larger from this pin to"

## LP2985IM5X-2.5/NOPBSOT23
designator U?, comment LP2985IM5X-2.5/NOPB
Out: 2.5V, 150 mA max; In: 2.5 V to 16 V; Pacakge: SOT-23-5; Output current: Up to 150 mA; Supply 1 Name: Mouser; Supply 1 SN: 926-LP2985IM5X25NOPB; Supply 2 Name: DigiKey; Supply 2 SN: 296-37597-2-ND; Datasheet: https://www.ti.com/lit/ds/symlink/lp2985.pdf?ts=1690340207505&ref_url=https%253A%252F%252Fwww.ti.com%252Fproduct%252FLP2985%253FkeyMatch%253DLM2985; Mounting Style: SMT; Package: SOT-23-5; Supply 1 URL: https://www.mouser.vn/ProductDetail/Texas-Instruments/LP2985IM5X-2.5-NOPB?qs=7lkVKPoqpbaNr2n6OKnAUQ%3D%3D; Supply 2 URL: https://www.digikey.com/en/products/detail/texas-instruments/LP2985IM5X-2-5-NOPB/367675?s=N4IgTCBcDaIDIAUwE4AcBWAkgWXQDQFowA6dAegDkB5BAIRAF0BfIA; V_IN range: 2.5 V to 16 V; V_OUT: 2.5V
footprint SOT23-5 (SOT143-4 as used in SP0503BAHTG)
pins: 1 VIN (in) "Input supply pin. Use a capacitor with a value of 1 µF or larger from this pin to ground.", 2 GND, 3 EN "Enable pin for the LDO. Driving the ON/OFF pin high enables the device. Driving this pin low", 4 BYPASS (io) "BYPASS pin to achieve low noise performance. Connecting an external capacitor between", 5 VOUT (out) "Output of the regulator. Use a capacitor with a value of 2.2 µF or larger from this pin to"

## LP2985IM5X-3.3/NOPBSOT23
designator U?, comment LP2985IM5X-3.3/NOPB
Out: 3.3V, 150 mA max; In: 2.5 V to 16 V; Pacakge: SOT-23-5; Output current: Up to 150 mA; Supply 1 Name: Mouser; Supply 1 SN: 926-LP2985IM5X33NOPB; Supply 2 Name: DigiKey; Supply 2 SN: LP2985IM5X-3.3/NOPBTR-ND; Supply 3 Name: thegioiic; Datasheet: https://www.ti.com/lit/ds/symlink/lp2985.pdf?ts=1690340207505&ref_url=https%253A%252F%252Fwww.ti.com%252Fproduct%252FLP2985%253FkeyMatch%253DLM2985; Mounting Style: SMT; Package: SOT-23-5; Supply 1 URL: https://www.mouser.vn/ProductDetail/Texas-Instruments/LP2985IM5X-3.3-NOPB?qs=7lkVKPoqpbarYOItF3geeg%3D%3D; Supply 2 URL: https://www.digikey.com/en/products/detail/texas-instruments/LP2985IM5X-3-3-NOPB/367679; Supply 3 URL: https://www.thegioiic.com/lp2985-33dbvr-ic-on-ap-3-3v-150ma; V_IN range: 2.5 V to 16 V; V_OUT: 3.3V
footprint SOT23-5 (SOT143-4 as used in SP0503BAHTG)
pins: 1 VIN (in) "Input supply pin. Use a capacitor with a value of 1 µF or larger from this pin to ground.", 2 GND, 3 EN "Enable pin for the LDO. Driving the ON/OFF pin high enables the device. Driving this pin low", 4 BYPASS (io) "BYPASS pin to achieve low noise performance. Connecting an external capacitor between", 5 VOUT (out) "Output of the regulator. Use a capacitor with a value of 2.2 µF or larger from this pin to"

## LP2985IM5X-5.0/NOPBSOT23
designator U?, comment LP2985IM5X-5.0/NOPB
Out: 5V, 150 mA max; In: 2.5 V to 16 V; Pacakge: SOT-23-5; Output current: Up to 150 mA; Supply 1 Name: Mouser; Supply 1 SN: 926-LP2985IM5X50NOPB; Supply 2 Name: DigiKey; Supply 2 SN: LP2985IM5X-5.0/NOPBTR-ND; Datasheet: https://www.ti.com/lit/ds/symlink/lp2985.pdf?ts=1690340207505&ref_url=https%253A%252F%252Fwww.ti.com%252Fproduct%252FLP2985%253FkeyMatch%253DLM2985; Mounting Style: SMT; Package: SOT-23-5; Supply 1 URL: https://www.mouser.vn/ProductDetail/Texas-Instruments/LP2985IM5X-5.0-NOPB?qs=7lkVKPoqpbZqObksDd83dw%3D%3D; Supply 2 URL: https://www.digikey.com/en/products/detail/texas-instruments/LP2985IM5X-5-0-NOPB/367680; V_IN range: 2.5 V to 16 V; V_OUT: 5V
footprint SOT23-5 (SOT143-4 as used in SP0503BAHTG)
pins: 1 VIN (in) "Input supply pin. Use a capacitor with a value of 1 µF or larger from this pin to ground.", 2 GND, 3 EN "Enable pin for the LDO. Driving the ON/OFF pin high enables the device. Driving this pin low", 4 BYPASS (io) "BYPASS pin to achieve low noise performance. Connecting an external capacitor between", 5 VOUT (out) "Output of the regulator. Use a capacitor with a value of 2.2 µF or larger from this pin to"

## LP2985IM5X-5.0SOT23
designator U?, comment LP2985IM5X-5.0
Out: 5V, 150 mA max; In: 2.5 V to 16 V; Pacakge: SOT-23-5; Output current: Up to 150 mA; Supply 1 Name: Mouser; Supply 1 SN: 926-LP2985IM5X-50; Supply 2 Name: DigiKey; Supply 2 SN: LP2985IM5X-5.0TR-ND; Datasheet: https://www.ti.com/lit/ds/symlink/lp2985.pdf?ts=1690340207505&ref_url=https%253A%252F%252Fwww.ti.com%252Fproduct%252FLP2985%253FkeyMatch%253DLM2985; Mounting Style: SMT; Package: SOT-23-5; Supply 1 URL: https://www.mouser.vn/ProductDetail/Texas-Instruments/LP2985IM5X-5.0?qs=7lkVKPoqpba%2FtUPktpLnaw%3D%3D; Supply 2 URL: https://www.digikey.com/en/products/detail/texas-instruments/LP2985IM5X-5-0/3697186; V_IN range: 2.5 V to 16 V; V_OUT: 5V
footprint SOT23-5 (SOT143-4 as used in SP0503BAHTG)
pins: 1 VIN (in) "Input supply pin. Use a capacitor with a value of 1 µF or larger from this pin to ground.", 2 GND, 3 EN "Enable pin for the LDO. Driving the ON/OFF pin high enables the device. Driving this pin low", 4 BYPASS (io) "BYPASS pin to achieve low noise performance. Connecting an external capacitor between", 5 VOUT (out) "Output of the regulator. Use a capacitor with a value of 2.2 µF or larger from this pin to"


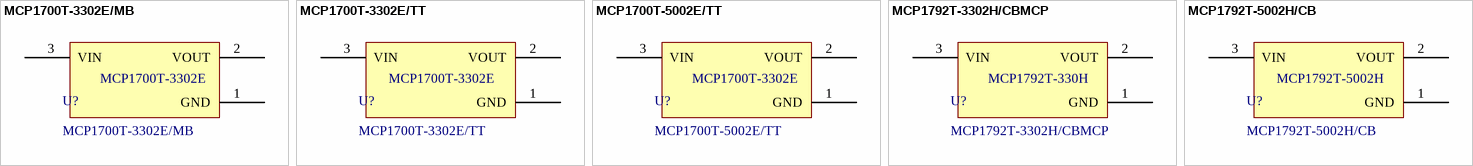
[diagram p6: symbols MCP1700T-3302E/MB to MCP1792T-5002H/CB]

## MCP1700T-3302E/MB
designator U?
LDO Voltage Regulators 250mA Adj LDO 2%; Manufacturer: Microchip Technology; Voltage Input: 6; Voltage Output: 3.3V; Supply 1 Name: Mouser; Supply 1 SN: 579-MCP1700T3302E/MB; Supply 2 Name: DigiKey; Supply 2 SN: MCP1700T3302EMBTR-ND; Supply 3 Name: ThegioiIC; Manufacturer Part Number: MCP1700T-3302E/MB; Mounting Technology: SMD; Current Input: *; Current Output: 250mA; Datasheet: https://www.mouser.com/datasheet/2/268/MCP1700_Data_Sheet_20001826F-737536.pdf; Supply 1 URL: https://www.mouser.com/ProductDetail/Microchip-Technology/MCP1700T-3302E-MB?qs=WWgnj3qycfnlJJhwyn%2Fifw%3D%3D; Supply 2 URL: https://www.digikey.com/en/products/detail/microchip-technology/MCP1700T-3302E-MB/652678; Supply 3 SN: *; Supply 3 URL: https://www.thegioiic.com/mcp1700t-3302e-mb-ic-on-ap-3-3v-250ma
footprint MCP1700T-3302E/MB (SOT89, 3-Leads, Body 4.50x2.21mm, Pitch 1.50mm, Lead Span 4.1mm)
pins: 1 GND (power), 2 VOUT (power), 3 VIN (power)
text: MCP1700T-3302E